# Altium schematic symbol library ABM8-12P000MHZ-B2-T.SchLib: 1 symbol
Pins are listed as number, name and electrical type; pins without a type are passive.

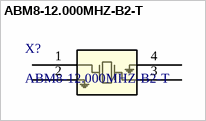
[diagram p0: symbol ABM8-12.000MHZ-B2-T]

## ABM8-12.000MHZ-B2-T
designator X?
No Description Available; Manufacturer_Name: Abracon; Copyright: Copyright (C) 2026 Ultra Librarian. All rights reserved.; Manufacturer_Part_Number: ABM8-12.000MHZ-B2-T; RefDes: RefDes; Type: Type
footprint ABM8_ABR
pins: 1, 2, 3, 4